# EAGLE library part IC_MCP3008 (library dp_devices.v6)
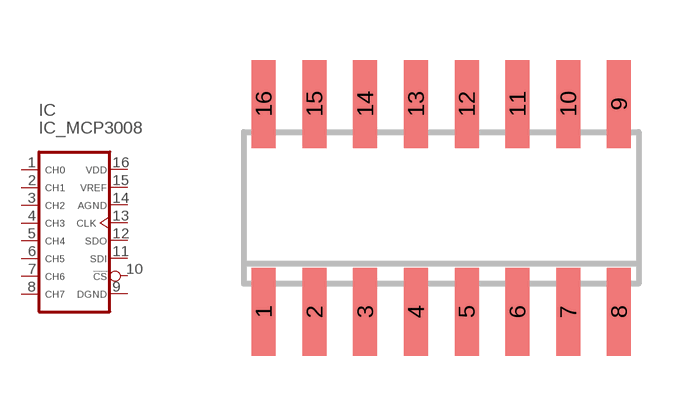
[diagram p156: symbol with the pads of SOIC-16; footprint SOIC-16]

Designator prefix IC

## IC_MCP3008  [SOIC-16]
1  CH0  in
2  CH1  in
3  CH2  in
4  CH3  in
5  CH4  in
6  CH5  in
7  CH6  in
8  CH7  in
9  DGND  pwr
10  !CS  in
11  SDI  in
12  SDO  out
13  CLK  in
14  AGND  pwr
15  VREF  in
16  VDD  pwr

## Footprint SOIC-16 (pad centres in mm)
smd 0.6 x 2.2: 1 -4.445,-2.6; 2 -3.175,-2.6; 3 -1.905,-2.6; 4 -0.635,-2.6; 5 0.635,-2.6; 6 1.905,-2.6; 7 3.175,-2.6; 8 4.445,-2.6; 9 4.445,2.6; 10 3.175,2.6; 11 1.905,2.6; 12 0.635,2.6; 13 -0.635,2.6; 14 -1.905,2.6; 15 -3.175,2.6; 16 -4.445,2.6